# Altium schematic symbol library OSTOQ027151.SchLib: 1 symbol
Pins are listed as number, name and electrical type; pins without a type are passive.

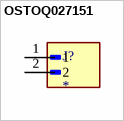
[diagram p0: symbol OSTOQ027151]

## OSTOQ027151
designator J?
2 Position Terminal Block Header, Male Pins, Shrouded (4 Side) 0.197 (5.00mm) 90Â°, Right Angle Through Hole; MF: On Shore; MP: OSTOQ027151; SnapEDA_Link: https://www.snapeda.com/parts/OSTOQ027151/ON/view-part/?ref=snap; Package: None; Value: *; Check_prices: https://www.snapeda.com/parts/OSTOQ027151/ON/view-part/?ref=eda
footprint OST_OSTOQ027151
pins: 1, 2